# Altium integrated library Integrated_Library1.IntLib: 1 symbol
Pins are listed as number, name and electrical type; pins without a type are passive.

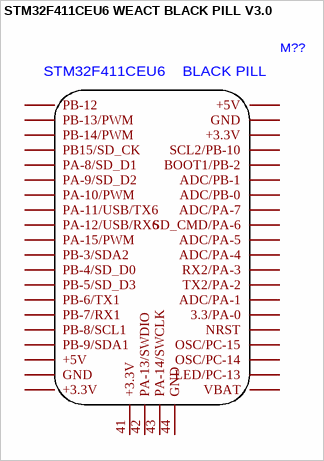
[diagram p0: symbol STM32F411CEU6 WEACT BLACK PILL V3.0]

## STM32F411CEU6 WEACT BLACK PILL V3.0
designator M??
footprint STM32F411CEU6BP
pins: 1 PB-12, 2 PB-13/PWM, 3 PB-14/PWM, 4 PB15/SD_CK, 5 PA-8/SD_D1, 6 PA-9/SD_D2, 7 PA-10/PWM, 8 PA-11/USB/TX6, 9 PA-12/USB/RX6, 10 PA-15/PWM, 11 PB-3/SDA2, 12 PB-4/SD_D0, 13 PB-5/SD_D3, 14 PB-6/TX1, 15 PB-7/RX1, 16 PB-8/SCL1, 17 PB-9/SDA1, 18 +5V, 19 GND, 20 +3.3V, 21 VBAT, 22 LED/PC-13, 23 OSC/PC-14, 24 OSC/PC-15, 25 NRST, 26 3.3/PA-0, 27 ADC/PA-1, 28 TX2/PA-2, 29 RX2/PA-3, 30 ADC/PA-4, 31 ADC/PA-5, 32 SD_CMD/PA-6, 33 ADC/PA-7, 34 ADC/PB-0, 35 ADC/PB-1, 36 BOOT1/PB-2, 37 SCL2/PB-10, 38 +3.3V, 39 GND, 40 +5V, 41 +3.3V, 42 PA-13/SWDIO, 43 PA-14/SWCLK, 44 GND
text: STM32F411CEU6; BLACK PILL